# Altium footprint library CoilcraftPCB.PcbLib: 320 footprints (part 19 of 20)
Each footprint in its own frame and in the unit in brackets; x right, y up, seen from the top. Pads: shape width x height; smd on the part's side, far side on the other; paste and mask are expansions set on the pad; w line width, h text height; cw(c..) or ccw(c..) is an arc to the next point about the centre after c.
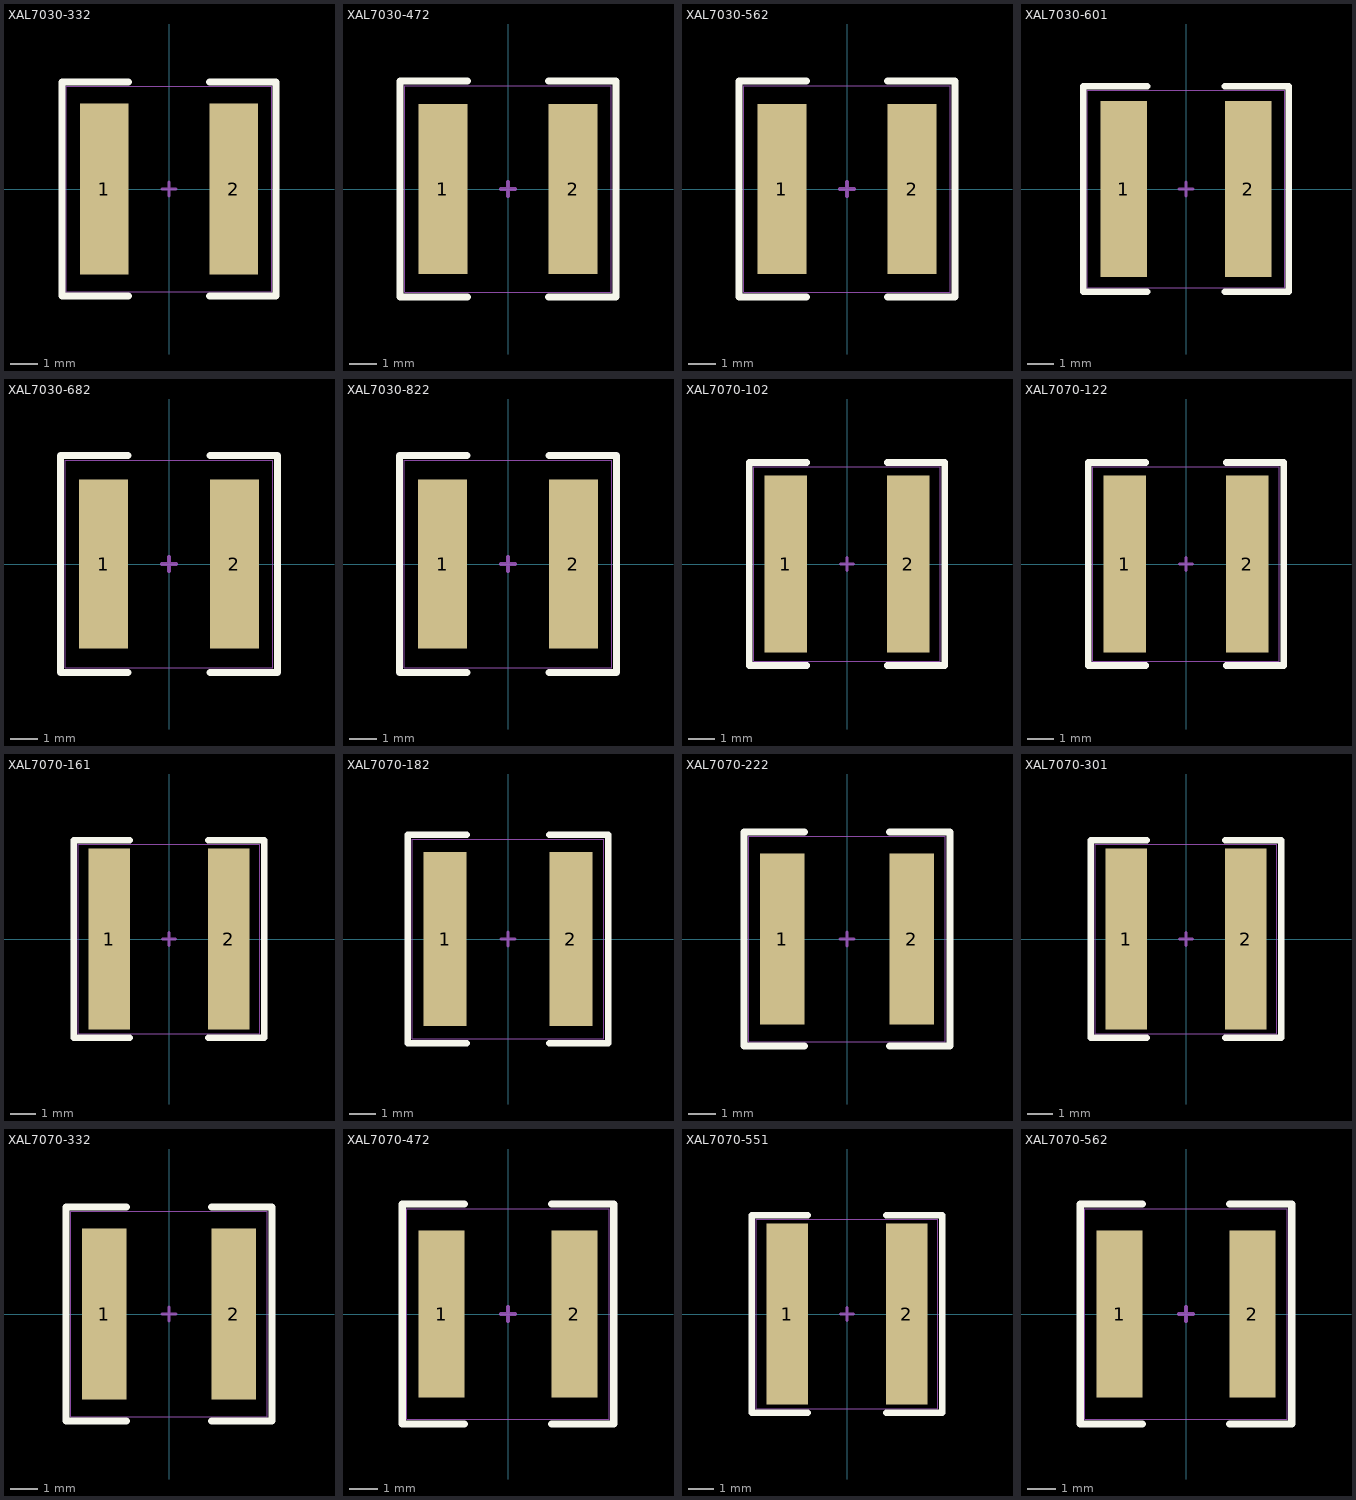
[diagram p18: the footprints below, top view; thin cyan lines are the x and y axes]

## XAL7030-332 [mil] "Coilcraft High Temperature Shielded Power Inductors"
height 122
pads (2):
  rect 70x245 smd: 1(-93,0) 2(93,0)
Top Overlay:
  lines w10: -58,-154 -154,-154 -154,154 -58,154 ; 58,-154 154,-154 154,154 58,154
Mechanical 13:
  lines w5: -10,0 10,0 ; 0,-10 0,10
Mechanical 14:
  lines w1: -147.5,-147.5 -147.5,147.5 147.5,147.5 147.5,-147.5 -147.5,-147.5
3D body: height 122.11, standoff 0.06, extent -157.48,-157.48 157.48,157.48

## XAL7030-472 [mil] "Coilcraft High Temperature Shielded Power Inductors"
height 122
pads (2):
  rect 70x242 smd: 1(-93,0) 2(93,0)
Top Overlay:
  lines w10: -58,-154 -154,-154 -154,154 -58,154 ; 58,-154 154,-154 154,154 58,154
Mechanical 13:
  lines w5: -10,0 10,0 ; 0,-10 0,10
Mechanical 14:
  lines w1: -147.5,-147.5 147.5,-147.5 147.5,147.5 -147.5,147.5 -147.5,-147.5
3D body: height 122.11, standoff 0.06, extent -157.48,-157.48 157.48,157.48

## XAL7030-562 [mil] "Coilcraft High Temperature Shielded Power Inductors"
height 122
pads (2):
  rect 70x242 smd: 1(-93,0) 2(93,0)
Top Overlay:
  lines w10: -58,-154 -154,-154 -154,154 -58,154 ; 58,-154 154,-154 154,154 58,154
Mechanical 13:
  lines w5: -10,0 10,0 ; 0,-10 0,10
Mechanical 14:
  lines w1: -147.5,-147.5 -147.5,147.5 147.5,147.5 147.5,-147.5 -147.5,-147.5
3D body: height 122.11, standoff 0.06, extent -157.48,-157.48 157.48,157.48

## XAL7030-601 [mil] "Coilcraft High Temperature Shielded Power Inductors"
height 122
pads (2):
  rect 70x263 smd: 1(-93,0) 2(93,0)
Top Overlay:
  lines w10: -58,-154 -154,-154 -154,154 -58,154 ; 58,-154 154,-154 154,154 58,154
Mechanical 13:
  lines w5: -10,0 10,0 ; 0,-10 0,10
Mechanical 14:
  lines w1: -147.5,-147.5 147.5,-147.5 147.5,147.5 -147.5,147.5 -147.5,-147.5
3D body: height 122.11, standoff 0.06, extent -157.48,-157.48 157.48,157.48

## XAL7030-682 [mil] "Coilcraft High Temperature Shielded Power Inductors"
height 122
pads (2):
  rect 70x240 smd: 1(-93,0) 2(93,0)
Top Overlay:
  lines w10: -58,-154 -154,-154 -154,154 -58,154 ; 58,-154 154,-154 154,154 58,154
Mechanical 13:
  lines w5: -10,0 10,0 ; 0,-10 0,10
Mechanical 14:
  lines w1: -147.5,-147.5 147.5,-147.5 147.5,147.5 -147.5,147.5 -147.5,-147.5
3D body: height 122.11, standoff 0.06, extent -157.48,-157.48 157.48,157.48

## XAL7030-822 [mil] "Coilcraft High Temperature Shielded Power Inductors"
height 122
pads (2):
  rect 70x240 smd: 1(-93,0) 2(93,0)
Top Overlay:
  lines w10: -58,-154 -154,-154 -154,154 -58,154 ; 58,-154 154,-154 154,154 58,154
Mechanical 13:
  lines w5: -10,0 10,0 ; 0,-10 0,10
Mechanical 14:
  lines w1: -147.5,-147.5 147.5,-147.5 147.5,147.5 -147.5,147.5 -147.5,-147.5
3D body: height 122.11, standoff 0.06, extent -157.48,-157.48 157.48,157.48

## XAL7070-102 [mil] "Coilcraft High Temperature Shielded Power Inductors"
height 276
pads (2):
  rect 64x269 smd: 1(-93,0) 2(93,0)
Top Overlay:
  lines w10: -61,-154 -148,-154 -148,154 -61,154 ; 61,-154 148,-154 148,154 61,154
Mechanical 13:
  lines w5: -10,0 10,0 ; 0,-10 0,10
Mechanical 14:
  lines w1: -141.5,-147.5 141.5,-147.5 141.5,147.5 -141.5,147.5 -141.5,-147.5
3D body: height 275.65, standoff 0.06, extent -151.58,-157.48 151.57,157.48

## XAL7070-122 [mil] "Coilcraft High Temperature Shielded Power Inductors"
height 276
pads (2):
  rect 64x269 smd: 1(-93,0) 2(93,0)
Top Overlay:
  lines w10: -61,-154 -148,-154 -148,154 -61,154 ; 61,-154 148,-154 148,154 61,154
Mechanical 13:
  lines w5: -10,0 10,0 ; 0,-10 0,10
Mechanical 14:
  lines w1: -141.5,-147.5 -141.5,147.5 141.5,147.5 141.5,-147.5 -141.5,-147.5
3D body: height 275.65, standoff 0.06, extent -151.58,-157.48 151.57,157.48

## XAL7070-161 [mil] "Coilcraft High Temperature Shielded Power Inductors"
height 276
pads (2):
  rect 64x281 smd: 1(-93,0) 2(93,0)
Top Overlay:
  lines w10: -61,-154 -148,-154 -148,154 -61,154 ; 61,-154 148,-154 148,154 61,154
Mechanical 13:
  lines w5: -10,0 10,0 ; 0,-10 0,10
Mechanical 14:
  lines w1: -141.5,-147.5 -141.5,147.5 141.5,147.5 141.5,-147.5 -141.5,-147.5
3D body: height 275.65, standoff 0.06, extent -151.58,-157.48 151.57,157.48

## XAL7070-182 [mil] "Coilcraft High Temperature Shielded Power Inductors"
height 276
pads (2):
  rect 64x257 smd: 1(-93,0) 2(93,0)
Top Overlay:
  lines w10: -61,-154 -148,-154 -148,154 -61,154 ; 61,-154 148,-154 148,154 61,154
Mechanical 13:
  lines w5: -10,0 10,0 ; 0,-10 0,10
Mechanical 14:
  lines w1: -141.5,-147.5 141.5,-147.5 141.5,147.5 -141.5,147.5 -141.5,-147.5
3D body: height 275.65, standoff 0.06, extent -151.58,-157.48 151.57,157.48

## XAL7070-222 [mil] "Coilcraft High Temperature Shielded Power Inductors"
height 276
pads (2):
  rect 64x245 smd: 1(-93,0) 2(93,0)
Top Overlay:
  lines w10: -61,-154 -148,-154 -148,154 -61,154 ; 61,-154 148,-154 148,154 61,154
Mechanical 13:
  lines w5: -10,0 10,0 ; 0,-10 0,10
Mechanical 14:
  lines w1: -141.5,-147.5 -141.5,147.5 141.5,147.5 141.5,-147.5 -141.5,-147.5
3D body: height 275.65, standoff 0.06, extent -151.58,-157.48 151.57,157.48

## XAL7070-301 [mil] "Coilcraft High Temperature Shielded Power Inductors"
height 276
pads (2):
  rect 64x281 smd: 1(-93,0) 2(93,0)
Top Overlay:
  lines w10: -61,-154 -148,-154 -148,154 -61,154 ; 61,-154 148,-154 148,154 61,154
Mechanical 13:
  lines w5: -10,0 10,0 ; 0,-10 0,10
Mechanical 14:
  lines w1: -141.5,-147.5 141.5,-147.5 141.5,147.5 -141.5,147.5 -141.5,-147.5
3D body: height 275.65, standoff 0.06, extent -151.58,-157.48 151.57,157.48

## XAL7070-332 [mil] "Coilcraft High Temperature Shielded Power Inductors"
height 276
pads (2):
  rect 64x245 smd: 1(-93,0) 2(93,0)
Top Overlay:
  lines w10: -61,-154 -148,-154 -148,154 -61,154 ; 61,-154 148,-154 148,154 61,154
Mechanical 13:
  lines w5: -10,0 10,0 ; 0,-10 0,10
Mechanical 14:
  lines w1: -141.5,-147.5 141.5,-147.5 141.5,147.5 -141.5,147.5 -141.5,-147.5
3D body: height 275.65, standoff 0.06, extent -151.58,-157.48 151.57,157.48

## XAL7070-472 [mil] "Coilcraft High Temperature Shielded Power Inductors"
height 276
pads (2):
  rect 64x234 smd: 1(-93,0) 2(93,0)
Top Overlay:
  lines w10: -61,-154 -148,-154 -148,154 -61,154 ; 61,-154 148,-154 148,154 61,154
Mechanical 13:
  lines w5: -10,0 10,0 ; 0,-10 0,10
Mechanical 14:
  lines w1: -141.5,-147.5 141.5,-147.5 141.5,147.5 -141.5,147.5 -141.5,-147.5
3D body: height 275.65, standoff 0.06, extent -151.58,-157.48 151.57,157.48

## XAL7070-551 [mil] "Coilcraft High Temperature Shielded Power Inductors"
height 276
pads (2):
  rect 64x281 smd: 1(-93,0) 2(93,0)
Top Overlay:
  lines w10: -61,-154 -148,-154 -148,154 -61,154 ; 61,-154 148,-154 148,154 61,154
Mechanical 13:
  lines w5: -10,0 10,0 ; 0,-10 0,10
Mechanical 14:
  lines w1: -141.5,-147.5 -141.5,147.5 141.5,147.5 141.5,-147.5 -141.5,-147.5
3D body: height 275.65, standoff 0.06, extent -151.58,-157.48 151.57,157.48

## XAL7070-562 [mil] "Coilcraft High Temperature Shielded Power Inductors"
height 276
pads (2):
  rect 64x234 smd: 1(-93,0) 2(93,0)
Top Overlay:
  lines w10: -61,-154 -148,-154 -148,154 -61,154 ; 61,-154 148,-154 148,154 61,154
Mechanical 13:
  lines w5: -10,0 10,0 ; 0,-10 0,10
Mechanical 14:
  lines w1: -141.5,-147.5 141.5,-147.5 141.5,147.5 -141.5,147.5 -141.5,-147.5
3D body: height 275.65, standoff 0.06, extent -151.58,-157.48 151.57,157.48